# Altium footprint library Package_DFN_QFN.PcbLib: 735 footprints (part 35 of 46)
Each footprint in its own frame and in the unit in brackets; x right, y up, seen from the top. Pads: shape width x height; smd on the part's side, far side on the other; paste and mask are expansions set on the pad; w line width, h text height; cw(c..) or ccw(c..) is an arc to the next point about the centre after c.
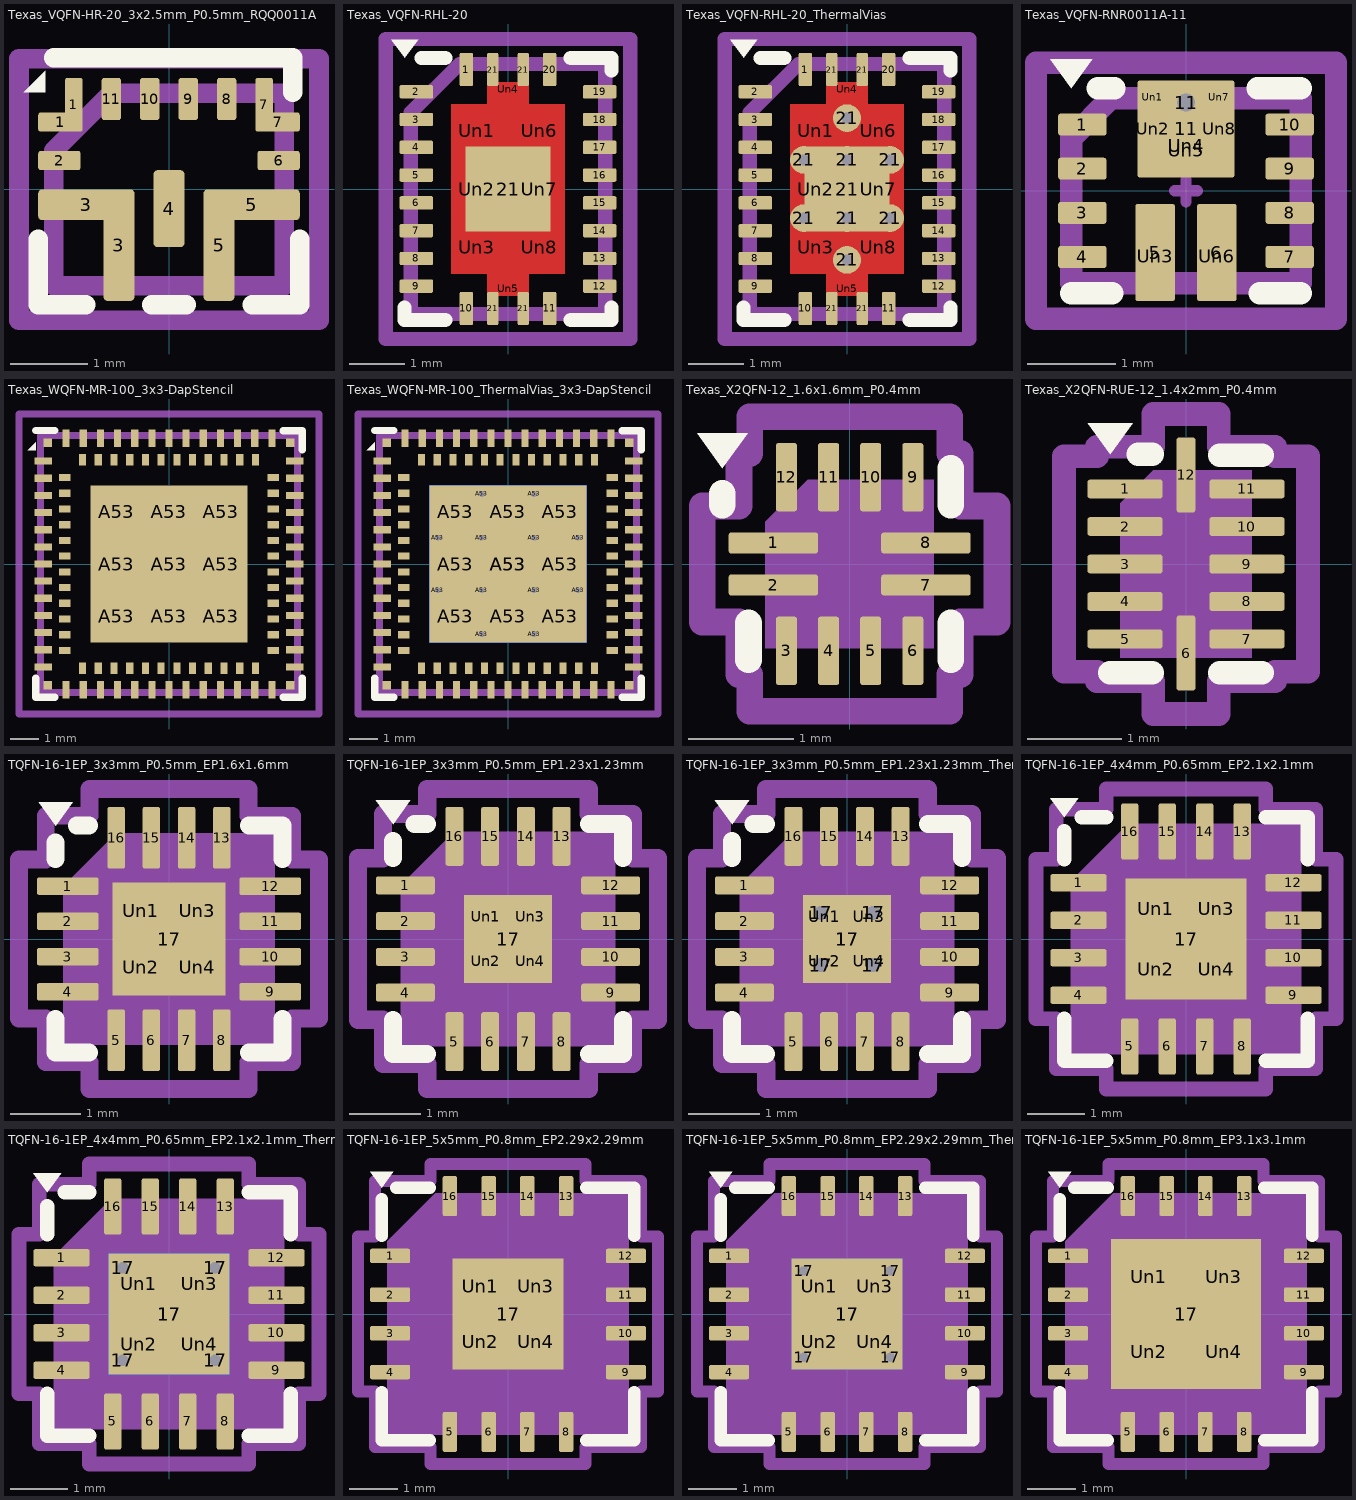
[diagram p34: the footprints below, top view; thin cyan lines are the x and y axes]

## Texas_VQFN-HR-20_3x2.5mm_P0.5mm_RQQ0011A [mm] "Texas_VQFN-HR-20_3x2.5mm_P0.5mm_RQQ0011A"
pads (15):
  rrect25% 0.575x0.25 smd: 1(-1.412,0.875) 7(1.412,0.875)
  rrect25% 0.225x0.7 smd: 1(-1.238,1.1) 7(1.238,1.1)
  rrect25% 0.55x0.25 smd: 2(-1.425,0.375) 6(1.425,0.375)
  rrect25% 1.25x0.4 smd: 3(-1.075,-0.2) 5(1.075,-0.2)
  rrect25% 0.4x1.45 smd: 3(-0.65,-0.725) 5(0.65,-0.725)
  rrect25% 0.4x1 smd: 4(0,-0.25)
  rrect25% 0.25x0.55 smd: 8(0.75,1.175) 9(0.25,1.175) 10(-0.25,1.175) 11(-0.75,1.175)
F.SilkS:
  region: -1.61,1.26 -1.89,1.26 -1.61,1.54
  lines w0.254: -1.7,-0.65 -1.7,-1.5 -1.08,-1.5 ; -1.5,1.71 1.61,1.71 1.61,1.26 ; -0.225,-1.5 0,-1.5 0.225,-1.5 ; 1.08,-1.5 1.7,-1.5 1.7,-0.65
Top Component Center:
  lines w0.127: -0.127,0 0.127,0 -0.127,0 ; 0,-0.127 0,0.127 0,-0.127
Top Assembly:
  lines w0.254: -1.5,-1.25 1.5,-1.25 1.5,1.25 -0.75,1.25 -1.5,0.5 -1.5,-1.25
Top Courtyard:
  lines w0.254: -1.95,-1.7 1.95,-1.7 1.95,1.7 -1.95,1.7 -1.95,-1.7
Top Designator:
  text ".Designator" at -3.43,-0.344 h1.52

## Texas_VQFN-RHL-20 [mm] "Texas_VQFN-RHL-20"
pads (33):
  rrect21% 0.24x0.6 smd: 1(-0.75,2.15) 10(-0.75,-2.15) 11(0.75,-2.15) 20(0.75,2.15)
  rrect21% 0.6x0.24 smd: 2(-1.65,1.75) 3(-1.65,1.25) 4(-1.65,0.75) 5(-1.65,0.25) 6(-1.65,-0.25) 7(-1.65,-0.75) 8(-1.65,-1.25) 9(-1.65,-1.75) 12(1.65,-1.75) 13(1.65,-1.25) 14(1.65,-0.75) 15(1.65,-0.25) 16(1.65,0.25) 17(1.65,0.75) 18(1.65,1.25) 19(1.65,1.75)
  rrect25% 0.2x0.6 smd: 21(-0.275,-2.15) 21(-0.275,2.15) 21(0.275,-2.15) 21(0.275,2.15)
  rect 1.524x1.524 smd: 21(0,0)
  rect 0.92x0.85 on Top Paste: Un1(-0.56,1.05) Un2(-0.56,0) Un3(-0.56,-1.05) Un6(0.56,1.05) Un7(0.56,0) Un8(0.56,-1.05)
  rect 0.75x0.25 on Top Paste: Un4(0,1.8) Un5(0,-1.8)
F.Cu:
  region: 0.375,1.525 1.025,1.525 1.025,-1.525 0.375,-1.525 0.375,-1.925 -0.375,-1.925 -0.375,-1.525 -1.025,-1.525 -1.025,1.525 -0.375,1.525 -0.375,1.925 0.375,1.925
F.SilkS:
  region: -1.86,2.36 -2.1,2.69 -1.62,2.69
  lines w0.254: -1.86,-2.13 -1.86,-2.36 -1.13,-2.36 ; -1.56,2.36 -1.13,2.36 ; 1.13,-2.36 1.86,-2.36 1.86,-2.13 ; 1.13,2.36 1.86,2.36 1.86,2.13
F.Mask:
  region: 0.375,1.525 1.025,1.525 1.025,-1.525 0.375,-1.525 0.375,-1.925 -0.375,-1.925 -0.375,-1.525 -1.025,-1.525 -1.025,1.525 -0.375,1.525 -0.375,1.925 0.375,1.925
Top Component Center:
  lines w0.127: -0.127,0 0.127,0 -0.127,0 ; 0,-0.127 0,0.127 0,-0.127
Top Assembly:
  lines w0.254: -1.75,-2.25 1.75,-2.25 1.75,2.25 -0.875,2.25 -1.75,1.375 -1.75,-2.25
Top Courtyard:
  lines w0.254: -2.2,-2.7 2.2,-2.7 2.2,2.7 -2.2,2.7 -2.2,-2.7
Top Designator:
  text ".Designator" at -3.43,-0.344 h1.52

## Texas_VQFN-RHL-20_ThermalVias [mm] "Texas_VQFN-RHL-20_ThermalVias"
pads (41):
  rrect21% 0.24x0.6 smd: 1(-0.75,2.15) 10(-0.75,-2.15) 11(0.75,-2.15) 20(0.75,2.15)
  rrect21% 0.6x0.24 smd: 2(-1.65,1.75) 3(-1.65,1.25) 4(-1.65,0.75) 5(-1.65,0.25) 6(-1.65,-0.25) 7(-1.65,-0.75) 8(-1.65,-1.25) 9(-1.65,-1.75) 12(1.65,-1.75) 13(1.65,-1.25) 14(1.65,-0.75) 15(1.65,-0.25) 16(1.65,0.25) 17(1.65,0.75) 18(1.65,1.25) 19(1.65,1.75)
  round 0.5 hole 0.2: 21(-0.775,-0.525) 21(-0.775,0.525) 21(0,-1.275) 21(0,-0.525) 21(0,0.525) 21(0,1.275) 21(0.775,-0.525) 21(0.775,0.525)
  rrect25% 0.2x0.6 smd: 21(-0.275,-2.15) 21(-0.275,2.15) 21(0.275,-2.15) 21(0.275,2.15)
  rect 1.524x1.524 smd: 21(0,0)
  rect 0.92x0.85 on Top Paste: Un1(-0.56,1.05) Un2(-0.56,0) Un3(-0.56,-1.05) Un6(0.56,1.05) Un7(0.56,0) Un8(0.56,-1.05)
  rect 0.75x0.25 on Top Paste: Un4(0,1.8) Un5(0,-1.8)
F.Cu:
  region: 0.375,1.525 1.025,1.525 1.025,-1.525 0.375,-1.525 0.375,-1.925 -0.375,-1.925 -0.375,-1.525 -1.025,-1.525 -1.025,1.525 -0.375,1.525 -0.375,1.925 0.375,1.925
F.SilkS:
  region: -1.86,2.36 -2.1,2.69 -1.62,2.69
  lines w0.254: -1.86,-2.13 -1.86,-2.36 -1.13,-2.36 ; -1.56,2.36 -1.13,2.36 ; 1.13,-2.36 1.86,-2.36 1.86,-2.13 ; 1.13,2.36 1.86,2.36 1.86,2.13
F.Mask:
  region: 0.375,1.525 1.025,1.525 1.025,-1.525 0.375,-1.525 0.375,-1.925 -0.375,-1.925 -0.375,-1.525 -1.025,-1.525 -1.025,1.525 -0.375,1.525 -0.375,1.925 0.375,1.925
Top Component Center:
  lines w0.127: -0.127,0 0.127,0 -0.127,0 ; 0,-0.127 0,0.127 0,-0.127
Top Assembly:
  lines w0.254: -1.75,-2.25 1.75,-2.25 1.75,2.25 -0.875,2.25 -1.75,1.375 -1.75,-2.25
Top Courtyard:
  lines w0.254: -2.2,-2.7 2.2,-2.7 2.2,2.7 -2.2,2.7 -2.2,-2.7
Top Designator:
  text ".Designator" at -3.43,-0.344 h1.52

## Texas_VQFN-RNR0011A-11 [mm] "Texas_VQFN-RNR0011A-11"
pads (20):
  rrect25% 0.55x0.25 smd: 1(-1.175,0.75) 2(-1.175,0.25) 3(-1.175,-0.25) 4(-1.175,-0.75) 7(1.175,-0.75) 8(1.175,-0.25) 9(1.175,0.25) 10(1.175,0.75)
  rrect12% 0.45x1.1 smd: 5(-0.35,-0.7) 6(0.35,-0.7)
  rrect5% 1.1x1.1 smd: 11(0,0.7)
  round 0.5 hole 0.2: 11(0,1)
  rrect10% 0.25x0.28 on Top Paste: Un1(-0.375,1.06) Un7(0.375,1.06)
  rrect15% 0.25x1 on Top Solder: Un2(-0.375,0.7) Un8(0.375,0.7)
  rrect10% 0.35x0.92 on Top Paste: Un3(-0.35,-0.74) Un6(0.35,-0.74)
  rrect10% 1x0.62 on Top Solder: Un4(0,0.51)
  rrect10% 1x0.52 on Top Paste: Un5(0,0.46)
F.SilkS:
  region: -1.3,1.16 -1.54,1.49 -1.06,1.49
  lines w0.254: -1.3,-1.16 -0.835,-1.16 ; -1,1.16 -0.81,1.16 ; 0.81,1.16 1.3,1.16 ; 0.835,-1.16 1.3,-1.16
F.Mask:
  lines w0.254: -0.3,0.87 ccw(c-0.2,0.87) -0.2,0.77 ; 0.2,0.77 ccw(c0.2,0.87) 0.3,0.87
Top Component Center:
  lines w0.127: -0.127,0 0.127,0 -0.127,0 ; 0,-0.127 0,0.127 0,-0.127
Top Assembly:
  lines w0.254: -1.3,-1.05 1.3,-1.05 1.3,1.05 -0.85,1.05 -1.3,0.6 -1.3,-1.05
Top Courtyard:
  lines w0.254: -1.7,-1.45 1.7,-1.45 1.7,1.45 -1.7,1.45 -1.7,-1.45
Top Designator:
  text ".Designator" at -2.251,-0.226 h1

## Texas_WQFN-MR-100_3x3-DapStencil [mm] "Texas_WQFN-MR-100_3x3-DapStencil"
pads (113):
  rect 0.6x0.25 smd: A1(-4.4,3.6) A2(-4.4,3) A3(-4.4,2.4) A4(-4.4,1.8) A5(-4.4,1.2) A6(-4.4,0.6) A7(-4.4,0) A8(-4.4,-0.6) A9(-4.4,-1.2) A10(-4.4,-1.8) A11(-4.4,-2.4) A12(-4.4,-3) A13(-4.4,-3.6) A27(4.4,-3.6) A28(4.4,-3) A29(4.4,-2.4) A30(4.4,-1.8) A31(4.4,-1.2) A32(4.4,-0.6) A33(4.4,0) A34(4.4,0.6) A35(4.4,1.2) A36(4.4,1.8) A37(4.4,2.4) A38(4.4,3) A39(4.4,3.6)
  rect 0.25x0.6 smd: A14(-3.6,-4.4) A15(-3,-4.4) A16(-2.4,-4.4) A17(-1.8,-4.4) A18(-1.2,-4.4) A19(-0.6,-4.4) A20(0,-4.4) A21(0.6,-4.4) A22(1.2,-4.4) A23(1.8,-4.4) A24(2.4,-4.4) A25(3,-4.4) A26(3.6,-4.4) A40(3.6,4.4) A41(3,4.4) A42(2.4,4.4) A43(1.8,4.4) A44(1.2,4.4) A45(0.6,4.4) A46(0,4.4) A47(-0.6,4.4) A48(-1.2,4.4) A49(-1.8,4.4) A50(-2.4,4.4) A51(-3,4.4) A52(-3.6,4.4)
  rect 1.83x1.83 smd: A53(-1.835,-1.835) A53(-1.835,1.835) A53(1.835,-1.835) A53(1.835,1.835)
  rect 1.83x1.84 smd: A53(-1.835,0) A53(1.835,0)
  rect 1.84x1.83 smd: A53(0,-1.835) A53(0,1.835)
  rect 1.84x1.84 smd: A53(0,0)
  rect 0.4x0.25 smd: B1(-3.65,3.025) B2(-3.65,2.475) B3(-3.65,1.925) B4(-3.65,1.375) B5(-3.65,0.825) B6(-3.65,0.275) B7(-3.65,-0.275) B8(-3.65,-0.825) B9(-3.65,-1.375) B10(-3.65,-1.925) B11(-3.65,-2.475) B12(-3.65,-3.025) B25(3.65,-3.025) B26(3.65,-2.475) B27(3.65,-1.925) B28(3.65,-1.375) B29(3.65,-0.825) B30(3.65,-0.275) B31(3.65,0.275) B32(3.65,0.825) B33(3.65,1.375) B34(3.65,1.925) B35(3.65,2.475) B36(3.65,3.025)
  rect 0.25x0.4 smd: B13(-3.025,-3.65) B14(-2.475,-3.65) B15(-1.925,-3.65) B16(-1.375,-3.65) B17(-0.825,-3.65) B18(-0.275,-3.65) B19(0.275,-3.65) B20(0.825,-3.65) B21(1.375,-3.65) B22(1.925,-3.65) B23(2.475,-3.65) B24(3.025,-3.65) B37(3.025,3.65) B38(2.475,3.65) B39(1.925,3.65) B40(1.375,3.65) B41(0.825,3.65) B42(0.275,3.65) B43(-0.275,3.65) B44(-0.825,3.65) B45(-1.375,3.65) B46(-1.925,3.65) B47(-2.475,3.65) B48(-3.025,3.65)
  rect 0.3x0.3 smd: C1(-4.25,4.25) C2(-4.25,-4.25) C3(4.25,-4.25) C4(4.25,4.25)
F.SilkS:
  region: -4.66,3.99 -4.94,3.99 -4.66,4.27
  lines w0.254: -4.67,4.67 -3.99,4.67 ; -4.66,-3.99 -4.66,-4.66 -3.99,-4.66 ; 3.99,-4.66 4.66,-4.66 4.66,-3.99 ; 3.99,4.66 4.66,4.66 4.66,3.99
Top Component Center:
  lines w0.127: -0.127,0 0.127,0 -0.127,0 ; 0,-0.127 0,0.127 0,-0.127
Top Assembly:
  lines w0.254: -4.5,-4.5 4.5,-4.5 4.5,4.5 -4.5,4.5 -4.5,-4.5
Top Courtyard:
  lines w0.254: -5.25,-5.25 5.25,-5.25 5.25,5.25 -5.25,5.25 -5.25,-5.25
Top Designator:
  text ".Designator" at -3.43,-0.344 h1.52
3D body "Texas_WQFN-MR-100.step": height 0.78, standoff 0, extent -4.5,-4.5 4.5,4.5

## Texas_WQFN-MR-100_ThermalVias_3x3-DapStencil [mm] "Texas_WQFN-MR-100_ThermalVias_3x3-DapStencil"
pads (126):
  rect 0.6x0.25 smd: A1(-4.4,3.6) A2(-4.4,3) A3(-4.4,2.4) A4(-4.4,1.8) A5(-4.4,1.2) A6(-4.4,0.6) A7(-4.4,0) A8(-4.4,-0.6) A9(-4.4,-1.2) A10(-4.4,-1.8) A11(-4.4,-2.4) A12(-4.4,-3) A13(-4.4,-3.6) A27(4.4,-3.6) A28(4.4,-3) A29(4.4,-2.4) A30(4.4,-1.8) A31(4.4,-1.2) A32(4.4,-0.6) A33(4.4,0) A34(4.4,0.6) A35(4.4,1.2) A36(4.4,1.8) A37(4.4,2.4) A38(4.4,3) A39(4.4,3.6)
  rect 0.25x0.6 smd: A14(-3.6,-4.4) A15(-3,-4.4) A16(-2.4,-4.4) A17(-1.8,-4.4) A18(-1.2,-4.4) A19(-0.6,-4.4) A20(0,-4.4) A21(0.6,-4.4) A22(1.2,-4.4) A23(1.8,-4.4) A24(2.4,-4.4) A25(3,-4.4) A26(3.6,-4.4) A40(3.6,4.4) A41(3,4.4) A42(2.4,4.4) A43(1.8,4.4) A44(1.2,4.4) A45(0.6,4.4) A46(0,4.4) A47(-0.6,4.4) A48(-1.2,4.4) A49(-1.8,4.4) A50(-2.4,4.4) A51(-3,4.4) A52(-3.6,4.4)
  round 0.5 hole 0.2: A53(-2.45,-0.92) A53(-2.45,0.92) A53(-0.92,-2.45) A53(-0.92,-0.92) A53(-0.92,0.92) A53(-0.92,2.45) A53(0.92,-2.45) A53(0.92,-0.92) A53(0.92,0.92) A53(0.92,2.45) A53(2.45,-0.92) A53(2.45,0.92)
  rect 1.83x1.83 smd: A53(-1.835,-1.835) A53(-1.835,1.835) A53(1.835,-1.835) A53(1.835,1.835)
  rect 1.83x1.84 smd: A53(-1.835,0) A53(1.835,0)
  rect 1.84x1.83 smd: A53(0,-1.835) A53(0,1.835)
  rect 1.84x1.84 smd: A53(0,0)
  rect 5.5x5.5 smd far side: A53(0,0)
  rect 0.4x0.25 smd: B1(-3.65,3.025) B2(-3.65,2.475) B3(-3.65,1.925) B4(-3.65,1.375) B5(-3.65,0.825) B6(-3.65,0.275) B7(-3.65,-0.275) B8(-3.65,-0.825) B9(-3.65,-1.375) B10(-3.65,-1.925) B11(-3.65,-2.475) B12(-3.65,-3.025) B25(3.65,-3.025) B26(3.65,-2.475) B27(3.65,-1.925) B28(3.65,-1.375) B29(3.65,-0.825) B30(3.65,-0.275) B31(3.65,0.275) B32(3.65,0.825) B33(3.65,1.375) B34(3.65,1.925) B35(3.65,2.475) B36(3.65,3.025)
  rect 0.25x0.4 smd: B13(-3.025,-3.65) B14(-2.475,-3.65) B15(-1.925,-3.65) B16(-1.375,-3.65) B17(-0.825,-3.65) B18(-0.275,-3.65) B19(0.275,-3.65) B20(0.825,-3.65) B21(1.375,-3.65) B22(1.925,-3.65) B23(2.475,-3.65) B24(3.025,-3.65) B37(3.025,3.65) B38(2.475,3.65) B39(1.925,3.65) B40(1.375,3.65) B41(0.825,3.65) B42(0.275,3.65) B43(-0.275,3.65) B44(-0.825,3.65) B45(-1.375,3.65) B46(-1.925,3.65) B47(-2.475,3.65) B48(-3.025,3.65)
  rect 0.3x0.3 smd: C1(-4.25,4.25) C2(-4.25,-4.25) C3(4.25,-4.25) C4(4.25,4.25)
F.SilkS:
  region: -4.66,3.99 -4.94,3.99 -4.66,4.27
  lines w0.254: -4.67,4.67 -3.99,4.67 ; -4.66,-3.99 -4.66,-4.66 -3.99,-4.66 ; 3.99,-4.66 4.66,-4.66 4.66,-3.99 ; 3.99,4.66 4.66,4.66 4.66,3.99
Top Component Center:
  lines w0.127: -0.127,0 0.127,0 -0.127,0 ; 0,-0.127 0,0.127 0,-0.127
Top Assembly:
  lines w0.254: -4.5,-4.5 -4.5,4.5 4.5,4.5 4.5,-4.5 -4.5,-4.5
Top Courtyard:
  lines w0.254: -5.25,-5.25 -5.25,5.25 5.25,5.25 5.25,-5.25 -5.25,-5.25
Top Designator:
  text ".Designator" at -3.43,-0.344 h1.52
3D body "Texas_WQFN-MR-100.step": height 0.78, standoff 0, extent -4.5,-4.5 4.5,4.5

## Texas_X2QFN-12_1.6x1.6mm_P0.4mm [mm] "Texas_X2QFN-12_1.6x1.6mm_P0.4mm"
pads (12):
  rrect25% 0.85x0.2 smd: 1(-0.725,0.2) 2(-0.725,-0.2) 7(0.725,-0.2) 8(0.725,0.2)
  rrect25% 0.2x0.65 smd: 3(-0.6,-0.825) 4(-0.2,-0.825) 5(0.2,-0.825) 6(0.6,-0.825) 9(0.6,0.825) 10(0.2,0.825) 11(-0.2,0.825) 12(-0.6,0.825)
F.SilkS:
  region: -1.21,0.91 -1.45,1.24 -0.97,1.24
  lines w0.254: -1.21,0.56 -1.21,0.67 ; -0.96,-0.91 -0.96,-0.56 ; 0.96,-0.91 0.96,-0.56 ; 0.96,0.56 0.96,0.91
Top Component Center:
  lines w0.127: -0.127,0 0.127,0 -0.127,0 ; 0,-0.127 0,0.127 0,-0.127
Top Assembly:
  region: 0.8,-0.8 -0.8,-0.8 -0.8,0.4 -0.4,0.8 0.8,0.8
Top Courtyard:
  lines w0.254: -1.4,-0.55 -1.05,-0.55 -1.05,-1.05 -0.95,-1.05 -0.95,-1.4 0.95,-1.4 0.95,-1.05 1.05,-1.05 1.05,-0.55 1.4,-0.55 1.4,0.55 1.05,0.55 1.05,1.05 0.95,1.05 0.95,1.4 -0.95,1.4 -0.95,1.05 -1.05,1.05 -1.05,0.55 -1.4,0.55 -1.4,-0.55
Top Designator:
  text ".Designator" at -2.251,-0.226 h1

## Texas_X2QFN-RUE-12_1.4x2mm_P0.4mm [mm] "Texas_X2QFN-RUE-12_1.4x2mm_P0.4mm"
pads (12):
  rrect25% 0.8x0.2 smd: 1(-0.65,0.8) 2(-0.65,0.4) 3(-0.65,0) 4(-0.65,-0.4) 5(-0.65,-0.8) 7(0.65,-0.8) 8(0.65,-0.4) 9(0.65,0) 10(0.65,0.4) 11(0.65,0.8)
  rrect25% 0.2x0.8 smd: 6(0,-0.95) 12(0,0.95)
F.SilkS:
  region: -0.81,1.17 -1.05,1.5 -0.57,1.5
  lines w0.254: -0.81,-1.16 -0.36,-1.16 ; -0.51,1.17 -0.36,1.17 ; 0.36,-1.16 0.81,-1.16 ; 0.36,1.16 0.81,1.16
Top Component Center:
  lines w0.127: -0.127,0 0.127,0 -0.127,0 ; 0,-0.127 0,0.127 0,-0.127
Top Assembly:
  region: 0.7,-1 -0.7,-1 -0.7,0.65 -0.35,1 0.7,1
Top Courtyard:
  lines w0.254: -1.3,-1.15 -0.95,-1.15 -0.95,-1.25 -0.35,-1.25 -0.35,-1.6 0.35,-1.6 0.35,-1.25 0.95,-1.25 0.95,-1.15 1.3,-1.15 1.3,1.15 0.95,1.15 0.95,1.25 0.35,1.25 0.35,1.6 -0.35,1.6 -0.35,1.25 -0.95,1.25 -0.95,1.15 -1.3,1.15 -1.3,-1.15
Top Designator:
  text ".Designator" at -2.251,-0.226 h1

## TQFN-16-1EP_3x3mm_P0.5mm_EP1.6x1.6mm [mm] "TQFN-16-1EP_3x3mm_P0.5mm_EP1.6x1.6mm"
pads (21):
  rrect25% 0.875x0.25 smd: 1(-1.438,0.75) 2(-1.438,0.25) 3(-1.438,-0.25) 4(-1.438,-0.75) 9(1.438,-0.75) 10(1.438,-0.25) 11(1.438,0.25) 12(1.438,0.75)
  rrect25% 0.25x0.875 smd: 5(-0.75,-1.438) 6(-0.25,-1.438) 7(0.25,-1.438) 8(0.75,-1.438) 13(0.75,1.438) 14(0.25,1.438) 15(-0.25,1.438) 16(-0.75,1.438)
  rect 1.6x1.6 smd: 17(0,0)
  rrect25% 0.64x0.64 on Top Paste: Un1(-0.4,0.4) Un2(-0.4,-0.4) Un3(0.4,0.4) Un4(0.4,-0.4)
F.SilkS:
  region: -1.61,1.61 -1.85,1.94 -1.37,1.94
  lines w0.254: -1.61,-1.135 -1.61,-1.61 -1.135,-1.61 ; -1.61,1.135 -1.61,1.37 ; -1.31,1.61 -1.135,1.61 ; 1.135,-1.61 1.61,-1.61 1.61,-1.135 ; 1.135,1.61 1.61,1.61 1.61,1.135
Top Component Center:
  lines w0.127: -0.127,0 0.127,0 -0.127,0 ; 0,-0.127 0,0.127 0,-0.127
Top Assembly:
  region: 1.5,-1.5 -1.5,-1.5 -1.5,0.75 -0.75,1.5 1.5,1.5
Top Courtyard:
  lines w0.254: -2.13,-1.13 -1.75,-1.13 -1.75,-1.75 -1.13,-1.75 -1.13,-2.13 1.13,-2.13 1.13,-1.75 1.75,-1.75 1.75,-1.13 2.13,-1.13 2.13,1.13 1.75,1.13 1.75,1.75 1.13,1.75 1.13,2.13 -1.13,2.13 -1.13,1.75 -1.75,1.75 -1.75,1.13 -2.13,1.13 -2.13,-1.13
Top Designator:
  text ".Designator" at -3.43,-0.344 h1.52
3D body "TQFN-16-1EP_3x3mm_P0.5mm_EP1.6x1.6mm.step": height 0.77, standoff 0, extent -1.5,-1.5 1.5,1.5

## TQFN-16-1EP_3x3mm_P0.5mm_EP1.23x1.23mm [mm] "TQFN-16-1EP_3x3mm_P0.5mm_EP1.23x1.23mm"
pads (21):
  rrect25% 0.825x0.25 smd: 1(-1.438,0.75) 2(-1.438,0.25) 3(-1.438,-0.25) 4(-1.438,-0.75) 9(1.438,-0.75) 10(1.438,-0.25) 11(1.438,0.25) 12(1.438,0.75)
  rrect25% 0.25x0.825 smd: 5(-0.75,-1.438) 6(-0.25,-1.438) 7(0.25,-1.438) 8(0.75,-1.438) 13(0.75,1.438) 14(0.25,1.438) 15(-0.25,1.438) 16(-0.75,1.438)
  rect 1.23x1.23 smd: 17(0,0)
  rrect25% 0.5x0.5 on Top Paste: Un1(-0.31,0.31) Un2(-0.31,-0.31) Un3(0.31,0.31) Un4(0.31,-0.31)
F.SilkS:
  region: -1.61,1.61 -1.85,1.94 -1.37,1.94
  lines w0.254: -1.61,-1.135 -1.61,-1.61 -1.135,-1.61 ; -1.61,1.135 -1.61,1.37 ; -1.31,1.61 -1.135,1.61 ; 1.135,-1.61 1.61,-1.61 1.61,-1.135 ; 1.135,1.61 1.61,1.61 1.61,1.135
Top Component Center:
  lines w0.127: -0.127,0 0.127,0 -0.127,0 ; 0,-0.127 0,0.127 0,-0.127
Top Assembly:
  region: 1.5,-1.5 -1.5,-1.5 -1.5,0.75 -0.75,1.5 1.5,1.5
Top Courtyard:
  lines w0.254: -2.1,-1.13 -1.75,-1.13 -1.75,-1.75 -1.13,-1.75 -1.13,-2.1 1.13,-2.1 1.13,-1.75 1.75,-1.75 1.75,-1.13 2.1,-1.13 2.1,1.13 1.75,1.13 1.75,1.75 1.13,1.75 1.13,2.1 -1.13,2.1 -1.13,1.75 -1.75,1.75 -1.75,1.13 -2.1,1.13 -2.1,-1.13
Top Designator:
  text ".Designator" at -3.43,-0.344 h1.52
3D body "TQFN-16-1EP_3x3mm_P0.5mm_EP1.6x1.6mm.step": height 0.77, standoff 0, extent -1.5,-1.5 1.5,1.5

## TQFN-16-1EP_3x3mm_P0.5mm_EP1.23x1.23mm_ThermalVias [mm] "TQFN-16-1EP_3x3mm_P0.5mm_EP1.23x1.23mm_ThermalVias"
pads (26):
  rrect25% 0.825x0.25 smd: 1(-1.438,0.75) 2(-1.438,0.25) 3(-1.438,-0.25) 4(-1.438,-0.75) 9(1.438,-0.75) 10(1.438,-0.25) 11(1.438,0.25) 12(1.438,0.75)
  rrect25% 0.25x0.825 smd: 5(-0.75,-1.438) 6(-0.25,-1.438) 7(0.25,-1.438) 8(0.75,-1.438) 13(0.75,1.438) 14(0.25,1.438) 15(-0.25,1.438) 16(-0.75,1.438)
  round 0.5 hole 0.2: 17(-0.365,-0.365) 17(-0.365,0.365) 17(0.365,-0.365) 17(0.365,0.365)
  rect 1.23x1.23 smd: 17(0,0)
  rect 1.23x1.23 smd far side: 17(0,0)
  rrect25% 0.53x0.53 on Top Paste: Un1(-0.31,0.31) Un2(-0.31,-0.31) Un3(0.31,0.31) Un4(0.31,-0.31)
F.SilkS:
  region: -1.61,1.61 -1.85,1.94 -1.37,1.94
  lines w0.254: -1.61,-1.135 -1.61,-1.61 -1.135,-1.61 ; -1.61,1.135 -1.61,1.37 ; -1.31,1.61 -1.135,1.61 ; 1.135,-1.61 1.61,-1.61 1.61,-1.135 ; 1.135,1.61 1.61,1.61 1.61,1.135
Top Component Center:
  lines w0.127: -0.127,0 0.127,0 -0.127,0 ; 0,-0.127 0,0.127 0,-0.127
Top Assembly:
  region: 1.5,-1.5 -1.5,-1.5 -1.5,0.75 -0.75,1.5 1.5,1.5
Top Courtyard:
  lines w0.254: -2.1,-1.13 -1.75,-1.13 -1.75,-1.75 -1.13,-1.75 -1.13,-2.1 1.13,-2.1 1.13,-1.75 1.75,-1.75 1.75,-1.13 2.1,-1.13 2.1,1.13 1.75,1.13 1.75,1.75 1.13,1.75 1.13,2.1 -1.13,2.1 -1.13,1.75 -1.75,1.75 -1.75,1.13 -2.1,1.13 -2.1,-1.13
Top Designator:
  text ".Designator" at -3.43,-0.344 h1.52

## TQFN-16-1EP_4x4mm_P0.65mm_EP2.1x2.1mm [mm] "TQFN-16-1EP_4x4mm_P0.65mm_EP2.1x2.1mm"
pads (21):
  rrect25% 0.975x0.3 smd: 1(-1.863,0.975) 2(-1.863,0.325) 3(-1.863,-0.325) 4(-1.863,-0.975) 9(1.863,-0.975) 10(1.863,-0.325) 11(1.863,0.325) 12(1.863,0.975)
  rrect25% 0.3x0.975 smd: 5(-0.975,-1.863) 6(-0.325,-1.863) 7(0.325,-1.863) 8(0.975,-1.863) 13(0.975,1.863) 14(0.325,1.863) 15(-0.325,1.863) 16(-0.975,1.863)
  rect 2.1x2.1 smd: 17(0,0)
  rrect25% 0.85x0.85 on Top Paste: Un1(-0.525,0.525) Un2(-0.525,-0.525) Un3(0.525,0.525) Un4(0.525,-0.525)
F.SilkS:
  region: -2.11,2.11 -2.35,2.44 -1.87,2.44
  lines w0.254: -2.11,-1.385 -2.11,-2.11 -1.385,-2.11 ; -2.11,1.385 -2.11,1.87 ; -1.81,2.11 -1.385,2.11 ; 1.385,-2.11 2.11,-2.11 2.11,-1.385 ; 1.385,2.11 2.11,2.11 2.11,1.385
Top Component Center:
  lines w0.127: -0.127,0 0.127,0 -0.127,0 ; 0,-0.127 0,0.127 0,-0.127
Top Assembly:
  region: 2,-2 -2,-2 -2,1 -1,2 2,2
Top Courtyard:
  lines w0.254: -2.6,-1.38 -2.25,-1.38 -2.25,-2.25 -1.38,-2.25 -1.38,-2.6 1.38,-2.6 1.38,-2.25 2.25,-2.25 2.25,-1.38 2.6,-1.38 2.6,1.38 2.25,1.38 2.25,2.25 1.38,2.25 1.38,2.6 -1.38,2.6 -1.38,2.25 -2.25,2.25 -2.25,1.38 -2.6,1.38 -2.6,-1.38
Top Designator:
  text ".Designator" at -3.43,-0.344 h1.52

## TQFN-16-1EP_4x4mm_P0.65mm_EP2.1x2.1mm_ThermalVias [mm] "TQFN-16-1EP_4x4mm_P0.65mm_EP2.1x2.1mm_ThermalVias"
pads (26):
  rrect25% 0.975x0.3 smd: 1(-1.863,0.975) 2(-1.863,0.325) 3(-1.863,-0.325) 4(-1.863,-0.975) 9(1.863,-0.975) 10(1.863,-0.325) 11(1.863,0.325) 12(1.863,0.975)
  rrect25% 0.3x0.975 smd: 5(-0.975,-1.863) 6(-0.325,-1.863) 7(0.325,-1.863) 8(0.975,-1.863) 13(0.975,1.863) 14(0.325,1.863) 15(-0.325,1.863) 16(-0.975,1.863)
  round 0.5 hole 0.2: 17(-0.8,-0.8) 17(-0.8,0.8) 17(0.8,-0.8) 17(0.8,0.8)
  rect 2.1x2.1 smd: 17(0,0)
  rect 2.1x2.1 smd far side: 17(0,0)
  rrect25% 0.85x0.85 on Top Paste: Un1(-0.525,0.525) Un2(-0.525,-0.525) Un3(0.525,0.525) Un4(0.525,-0.525)
F.SilkS:
  region: -2.11,2.11 -2.35,2.44 -1.87,2.44
  lines w0.254: -2.11,-1.385 -2.11,-2.11 -1.385,-2.11 ; -2.11,1.385 -2.11,1.87 ; -1.81,2.11 -1.385,2.11 ; 1.385,-2.11 2.11,-2.11 2.11,-1.385 ; 1.385,2.11 2.11,2.11 2.11,1.385
Top Component Center:
  lines w0.127: -0.127,0 0.127,0 -0.127,0 ; 0,-0.127 0,0.127 0,-0.127
Top Assembly:
  region: 2,-2 -2,-2 -2,1 -1,2 2,2
Top Courtyard:
  lines w0.254: -2.6,-1.38 -2.25,-1.38 -2.25,-2.25 -1.38,-2.25 -1.38,-2.6 1.38,-2.6 1.38,-2.25 2.25,-2.25 2.25,-1.38 2.6,-1.38 2.6,1.38 2.25,1.38 2.25,2.25 1.38,2.25 1.38,2.6 -1.38,2.6 -1.38,2.25 -2.25,2.25 -2.25,1.38 -2.6,1.38 -2.6,-1.38
Top Designator:
  text ".Designator" at -3.43,-0.344 h1.52

## TQFN-16-1EP_5x5mm_P0.8mm_EP2.29x2.29mm [mm] "TQFN-16-1EP_5x5mm_P0.8mm_EP2.29x2.29mm"
pads (21):
  rrect25% 0.825x0.3 smd: 1(-2.438,1.2) 2(-2.438,0.4) 3(-2.438,-0.4) 4(-2.438,-1.2) 9(2.438,-1.2) 10(2.438,-0.4) 11(2.438,0.4) 12(2.438,1.2)
  rrect25% 0.3x0.825 smd: 5(-1.2,-2.438) 6(-0.4,-2.438) 7(0.4,-2.438) 8(1.2,-2.438) 13(1.2,2.438) 14(0.4,2.438) 15(-0.4,2.438) 16(-1.2,2.438)
  rect 2.29x2.29 smd: 17(0,0)
  rrect25% 0.92x0.92 on Top Paste: Un1(-0.57,0.57) Un2(-0.57,-0.57) Un3(0.57,0.57) Un4(0.57,-0.57)
F.SilkS:
  region: -2.61,2.61 -2.85,2.94 -2.37,2.94
  lines w0.254: -2.61,-1.61 -2.61,-2.61 -1.61,-2.61 ; -2.61,1.61 -2.61,2.37 ; -2.31,2.61 -1.61,2.61 ; 1.61,-2.61 2.61,-2.61 2.61,-1.61 ; 1.61,2.61 2.61,2.61 2.61,1.61
Top Component Center:
  lines w0.127: -0.127,0 0.127,0 -0.127,0 ; 0,-0.127 0,0.127 0,-0.127
Top Assembly:
  region: 2.5,-2.5 -2.5,-2.5 -2.5,1.5 -1.5,2.5 2.5,2.5
Top Courtyard:
  lines w0.254: -3.1,-1.6 -3.1,1.6 -2.75,1.6 -2.75,2.75 -1.6,2.75 -1.6,3.1 1.6,3.1 1.6,2.75 2.75,2.75 2.75,1.6 3.1,1.6 3.1,-1.6 2.75,-1.6 2.75,-2.75 1.6,-2.75 1.6,-3.1 -1.6,-3.1 -1.6,-2.75 -2.75,-2.75 -2.75,-1.6 -3.1,-1.6
Top Designator:
  text ".Designator" at -3.43,-0.344 h1.52

## TQFN-16-1EP_5x5mm_P0.8mm_EP2.29x2.29mm_ThermalVias [mm] "TQFN-16-1EP_5x5mm_P0.8mm_EP2.29x2.29mm_ThermalVias"
pads (26):
  rrect25% 0.825x0.3 smd: 1(-2.438,1.2) 2(-2.438,0.4) 3(-2.438,-0.4) 4(-2.438,-1.2) 9(2.438,-1.2) 10(2.438,-0.4) 11(2.438,0.4) 12(2.438,1.2)
  rrect25% 0.3x0.825 smd: 5(-1.2,-2.438) 6(-0.4,-2.438) 7(0.4,-2.438) 8(1.2,-2.438) 13(1.2,2.438) 14(0.4,2.438) 15(-0.4,2.438) 16(-1.2,2.438)
  round 0.5 hole 0.2: 17(-0.895,-0.895) 17(-0.895,0.895) 17(0.895,-0.895) 17(0.895,0.895)
  rect 2.29x2.29 smd: 17(0,0)
  rect 2.29x2.29 smd far side: 17(0,0)
  rrect25% 0.99x0.99 on Top Paste: Un1(-0.57,0.57) Un2(-0.57,-0.57) Un3(0.57,0.57) Un4(0.57,-0.57)
F.SilkS:
  region: -2.61,2.61 -2.85,2.94 -2.37,2.94
  lines w0.254: -2.61,-1.61 -2.61,-2.61 -1.61,-2.61 ; -2.61,1.61 -2.61,2.37 ; -2.31,2.61 -1.61,2.61 ; 1.61,-2.61 2.61,-2.61 2.61,-1.61 ; 1.61,2.61 2.61,2.61 2.61,1.61
Top Component Center:
  lines w0.127: -0.127,0 0.127,0 -0.127,0 ; 0,-0.127 0,0.127 0,-0.127
Top Assembly:
  region: 2.5,-2.5 -2.5,-2.5 -2.5,1.5 -1.5,2.5 2.5,2.5
Top Courtyard:
  lines w0.254: -3.1,-1.6 -2.75,-1.6 -2.75,-2.75 -1.6,-2.75 -1.6,-3.1 1.6,-3.1 1.6,-2.75 2.75,-2.75 2.75,-1.6 3.1,-1.6 3.1,1.6 2.75,1.6 2.75,2.75 1.6,2.75 1.6,3.1 -1.6,3.1 -1.6,2.75 -2.75,2.75 -2.75,1.6 -3.1,1.6 -3.1,-1.6
Top Designator:
  text ".Designator" at -3.43,-0.344 h1.52

## TQFN-16-1EP_5x5mm_P0.8mm_EP3.1x3.1mm [mm] "TQFN-16-1EP_5x5mm_P0.8mm_EP3.1x3.1mm"
pads (21):
  rrect25% 0.825x0.3 smd: 1(-2.438,1.2) 2(-2.438,0.4) 3(-2.438,-0.4) 4(-2.438,-1.2) 9(2.438,-1.2) 10(2.438,-0.4) 11(2.438,0.4) 12(2.438,1.2)
  rrect25% 0.3x0.825 smd: 5(-1.2,-2.438) 6(-0.4,-2.438) 7(0.4,-2.438) 8(1.2,-2.438) 13(1.2,2.438) 14(0.4,2.438) 15(-0.4,2.438) 16(-1.2,2.438)
  rect 3.1x3.1 smd: 17(0,0)
  rrect20% 1.25x1.25 on Top Paste: Un1(-0.775,0.775) Un2(-0.775,-0.775) Un3(0.775,0.775) Un4(0.775,-0.775)
F.SilkS:
  region: -2.61,2.61 -2.85,2.94 -2.37,2.94
  lines w0.254: -2.61,-1.61 -2.61,-2.61 -1.61,-2.61 ; -2.61,1.61 -2.61,2.37 ; -2.31,2.61 -1.61,2.61 ; 1.61,-2.61 2.61,-2.61 2.61,-1.61 ; 1.61,2.61 2.61,2.61 2.61,1.61
Top Component Center:
  lines w0.127: -0.127,0 0.127,0 -0.127,0 ; 0,-0.127 0,0.127 0,-0.127
Top Assembly:
  region: 2.5,-2.5 -2.5,-2.5 -2.5,1.5 -1.5,2.5 2.5,2.5
Top Courtyard:
  lines w0.254: -3.1,-1.6 -2.75,-1.6 -2.75,-2.75 -1.6,-2.75 -1.6,-3.1 1.6,-3.1 1.6,-2.75 2.75,-2.75 2.75,-1.6 3.1,-1.6 3.1,1.6 2.75,1.6 2.75,2.75 1.6,2.75 1.6,3.1 -1.6,3.1 -1.6,2.75 -2.75,2.75 -2.75,1.6 -3.1,1.6 -3.1,-1.6
Top Designator:
  text ".Designator" at -3.43,-0.344 h1.52